# Altium footprint library 固定柱.PcbLib: 140 footprints (part 3 of 9)
Each footprint in its own frame and in the unit in brackets; x right, y up, seen from the top. Pads: shape width x height; smd on the part's side, far side on the other; paste and mask are expansions set on the pad; w line width, h text height; cw(c..) or ccw(c..) is an arc to the next point about the centre after c.
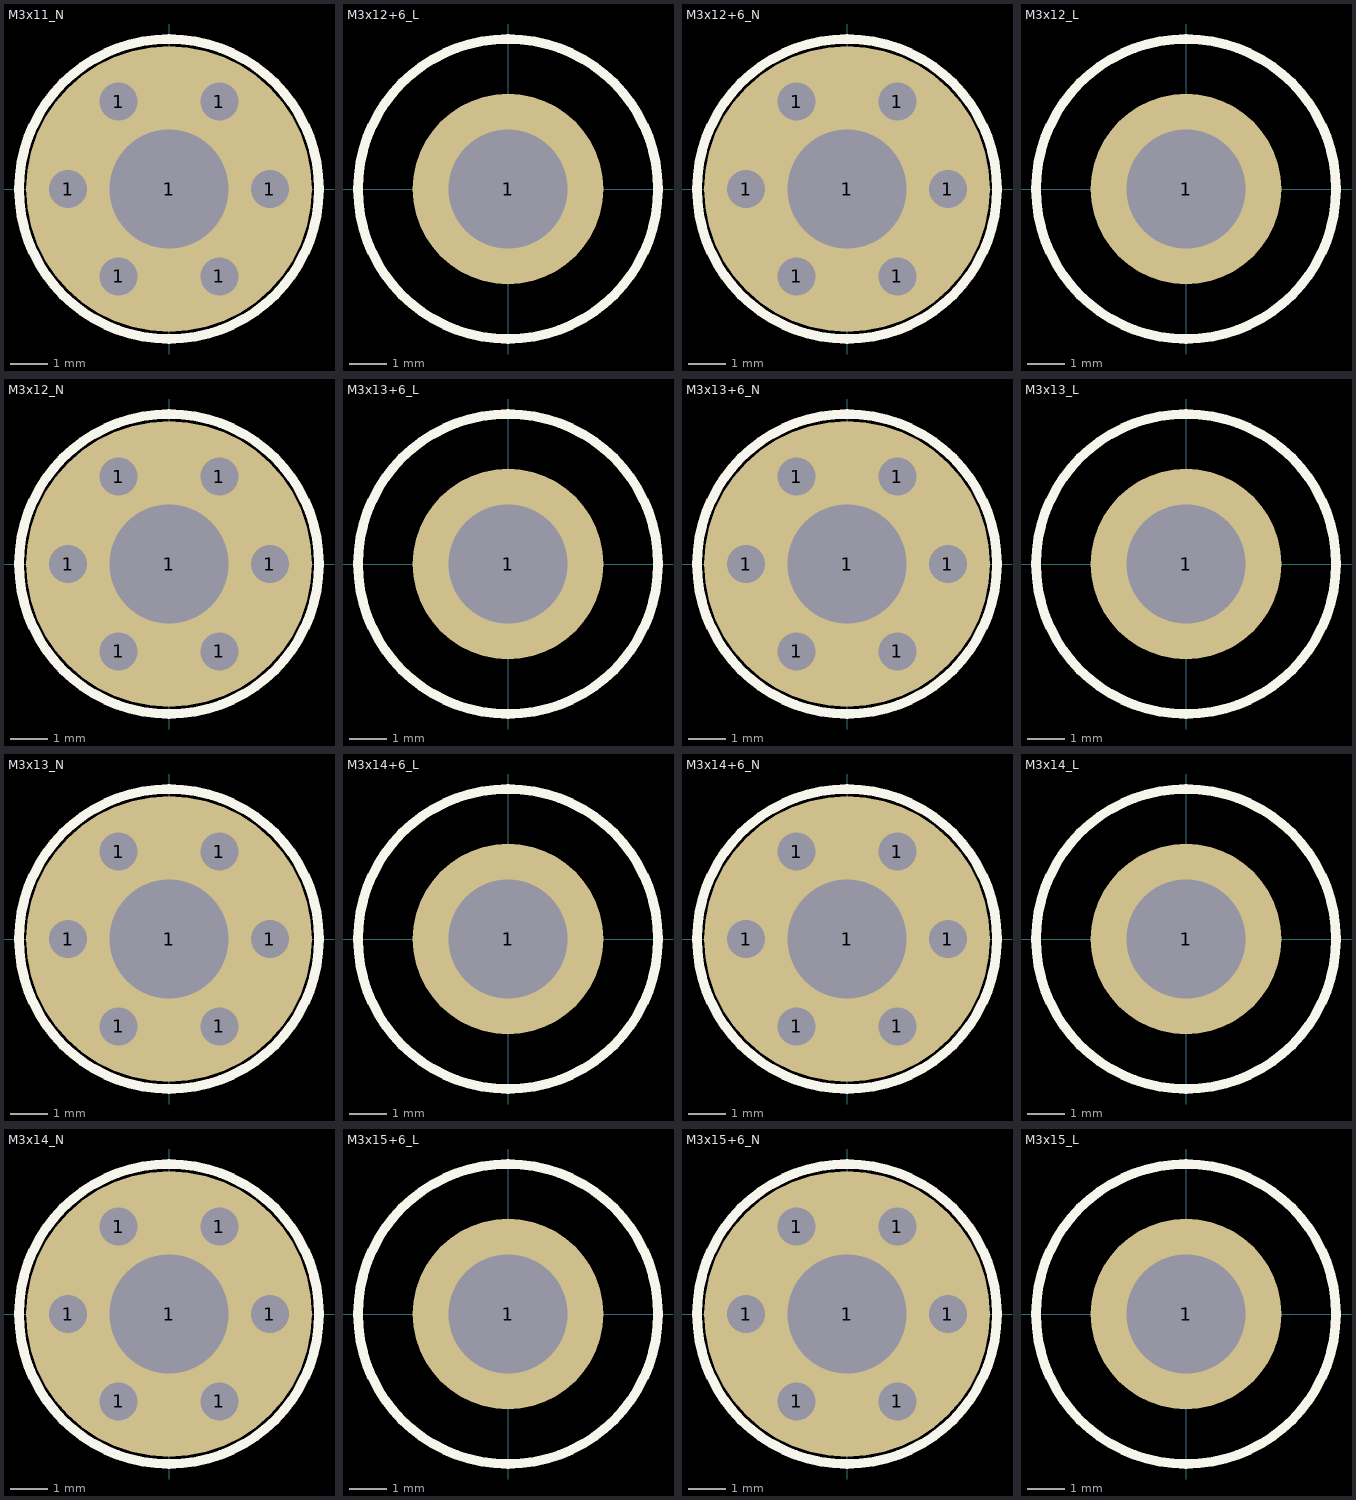
[diagram p2: the footprints below, top view; thin cyan lines are the x and y axes]

## M3x11_N [mil] "M3铜柱，长：11mm"
pads (7):
  round 40 hole 40: 1(-106,0) 1(-53,-91.8) 1(-53,91.8) 1(53,-91.8) 1(53,91.8) 1(106,0)
  round 300 hole 125: 1(0,0)
Top Overlay:
  circle w10: c0,0 r157.48
3D body "M3x11.STEP": height 435.05, standoff 1.96, extent -106.22,-92.52 106.22,92.52

## M3x12+6_L [mil] "M3铜柱，长：12mm，螺纹长：6mm"
pads (1):
  round 200 hole 125: 1(0,0)
Top Overlay:
  circle w10: c0,0 r157.48
3D body "M3x12+6.STEP": height 474.42, standoff -234.25, extent -106.22,-92.52 106.22,92.52

## M3x12+6_N [mil] "M3铜柱，长：12mm，螺纹长：6mm"
pads (7):
  round 40 hole 40: 1(-106,0) 1(-53,-91.8) 1(-53,91.8) 1(53,-91.8) 1(53,91.8) 1(106,0)
  round 300 hole 125: 1(0,0)
Top Overlay:
  circle w10: c0,0 r157.48
3D body "M3x12+6.STEP": height 474.42, standoff -234.25, extent -106.22,-92.52 106.22,92.52

## M3x12_L [mil] "M3铜柱，长：12mm"
pads (1):
  round 200 hole 125: 1(0,0)
Top Overlay:
  circle w10: c0,0 r157.48
3D body "M3x12.STEP": height 474.42, standoff 1.96, extent -106.22,-92.52 106.22,92.52

## M3x12_N [mil] "M3铜柱，长：12mm"
pads (7):
  round 40 hole 40: 1(-106,0) 1(-53,-91.8) 1(-53,91.8) 1(53,-91.8) 1(53,91.8) 1(106,0)
  round 300 hole 125: 1(0,0)
Top Overlay:
  circle w10: c0,0 r157.48
3D body "M3x12.STEP": height 474.42, standoff 1.96, extent -106.22,-92.52 106.22,92.52

## M3x13+6_L [mil] "M3铜柱，长：13mm，螺纹长：6mm"
pads (1):
  round 200 hole 125: 1(0,0)
Top Overlay:
  circle w10: c0,0 r157.48
3D body "M3x13+6.STEP": height 513.8, standoff -234.25, extent -106.22,-92.52 106.22,92.52

## M3x13+6_N [mil] "M3铜柱，长：13mm，螺纹长：6mm"
pads (7):
  round 40 hole 40: 1(-106,0) 1(-53,-91.8) 1(-53,91.8) 1(53,-91.8) 1(53,91.8) 1(106,0)
  round 300 hole 125: 1(0,0)
Top Overlay:
  circle w10: c0,0 r157.48
3D body "M3x13+6.STEP": height 513.8, standoff -234.25, extent -106.22,-92.52 106.22,92.52

## M3x13_L [mil] "M3铜柱，长：13mm"
pads (1):
  round 200 hole 125: 1(0,0)
Top Overlay:
  circle w10: c0,0 r157.48
3D body "M3x13.STEP": height 513.79, standoff 1.96, extent -106.22,-92.52 106.22,92.52

## M3x13_N [mil] "M3铜柱，长：13mm"
pads (7):
  round 40 hole 40: 1(-106,0) 1(-53,-91.8) 1(-53,91.8) 1(53,-91.8) 1(53,91.8) 1(106,0)
  round 300 hole 125: 1(0,0)
Top Overlay:
  circle w10: c0,0 r157.48
3D body "M3x13.STEP": height 513.79, standoff 1.96, extent -106.22,-92.52 106.22,92.52

## M3x14+6_L [mil] "M3铜柱，长：14mm，螺纹长：6mm"
pads (1):
  round 200 hole 125: 1(0,0)
Top Overlay:
  circle w10: c0,0 r157.48
3D body "M3x14+6.STEP": height 553.16, standoff -234.25, extent -106.22,-92.52 106.22,92.52

## M3x14+6_N [mil] "M3铜柱，长：14mm，螺纹长：6mm"
pads (7):
  round 40 hole 40: 1(-106,0) 1(-53,-91.8) 1(-53,91.8) 1(53,-91.8) 1(53,91.8) 1(106,0)
  round 300 hole 125: 1(0,0)
Top Overlay:
  circle w10: c0,0 r157.48
3D body "M3x14+6.STEP": height 553.16, standoff -234.25, extent -106.22,-92.52 106.22,92.52

## M3x14_L [mil] "M3铜柱，长：14mm"
pads (1):
  round 200 hole 125: 1(0,0)
Top Overlay:
  circle w10: c0,0 r157.48
3D body "M3x14.STEP": height 553.16, standoff 1.96, extent -106.22,-92.52 106.22,92.52

## M3x14_N [mil] "M3铜柱，长：14mm"
pads (7):
  round 40 hole 40: 1(-106,0) 1(-53,-91.8) 1(-53,91.8) 1(53,-91.8) 1(53,91.8) 1(106,0)
  round 300 hole 125: 1(0,0)
Top Overlay:
  circle w10: c0,0 r157.48
3D body "M3x14.STEP": height 553.16, standoff 1.96, extent -106.22,-92.52 106.22,92.52

## M3x15+6_L [mil] "M3铜柱，长：15mm，螺纹长：6mm"
pads (1):
  round 200 hole 125: 1(0,0)
Top Overlay:
  circle w10: c0,0 r157.48
3D body "M3x15+6.STEP": height 592.53, standoff -234.25, extent -106.22,-92.52 106.22,92.52

## M3x15+6_N [mil] "M3铜柱，长：15mm，螺纹长：6mm"
pads (7):
  round 40 hole 40: 1(-106,0) 1(-53,-91.8) 1(-53,91.8) 1(53,-91.8) 1(53,91.8) 1(106,0)
  round 300 hole 125: 1(0,0)
Top Overlay:
  circle w10: c0,0 r157.48
3D body "M3x15+6.STEP": height 592.53, standoff -234.25, extent -106.22,-92.52 106.22,92.52

## M3x15_L [mil] "M3铜柱，长：15mm"
pads (1):
  round 200 hole 125: 1(0,0)
Top Overlay:
  circle w10: c0,0 r157.48
3D body "M3x15.STEP": height 592.53, standoff 1.96, extent -106.22,-92.52 106.22,92.52